# Altium footprint library XCVR_ESP32-C5-MINI-1-N4.PcbLib: 1 footprints
Each footprint in its own frame and in the unit in brackets; x right, y up, seen from the top. Pads: shape width x height; smd on the part's side, far side on the other; paste and mask are expansions set on the pad; w line width, h text height; cw(c..) or ccw(c..) is an arc to the next point about the centre after c.
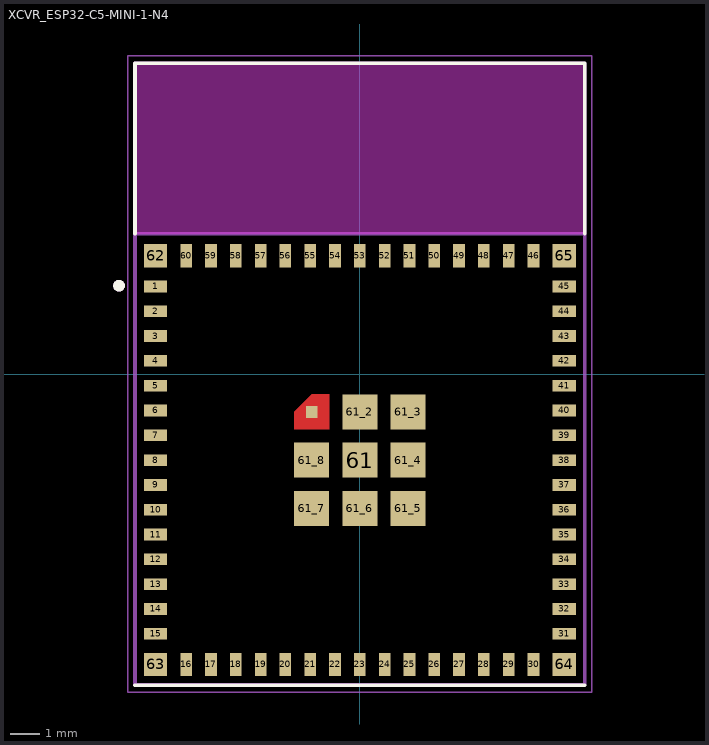
[diagram p0: the footprint, top view; thin cyan lines are the x and y axes]

## XCVR_ESP32-C5-MINI-1-N4 [mm]
height 2.55
pads (73):
  rect 0.8x0.4 smd paste+0 mask+0.102: 1(-7,3) 2(-7,2.15) 3(-7,1.3) 4(-7,0.45) 5(-7,-0.4) 6(-7,-1.25) 7(-7,-2.1) 8(-7,-2.95) 9(-7,-3.8) 10(-7,-4.65) 11(-7,-5.5) 12(-7,-6.35) 13(-7,-7.2) 14(-7,-8.05) 15(-7,-8.9) 31(7,-8.9) 32(7,-8.05) 33(7,-7.2) 34(7,-6.35) 35(7,-5.5) 36(7,-4.65) 37(7,-3.8) 38(7,-2.95) 39(7,-2.1) 40(7,-1.25) 41(7,-0.4) 42(7,0.45) 43(7,1.3) 44(7,2.15) 45(7,3)
  rect 0.4x0.8 smd paste+0 mask+0.102: 16(-5.95,-9.95) 17(-5.1,-9.95) 18(-4.25,-9.95) 19(-3.4,-9.95) 20(-2.55,-9.95) 21(-1.7,-9.95) 22(-0.85,-9.95) 23(0,-9.95) 24(0.85,-9.95) 25(1.7,-9.95) 26(2.55,-9.95) 27(3.4,-9.95) 28(4.25,-9.95) 29(5.1,-9.95) 30(5.95,-9.95) 46(5.95,4.05) 47(5.1,4.05) 48(4.25,4.05) 49(3.4,4.05) 50(2.55,4.05) 51(1.7,4.05) 52(0.85,4.05) 53(0,4.05) 54(-0.85,4.05) 55(-1.7,4.05) 56(-2.55,4.05) 57(-3.4,4.05) 58(-4.25,4.05) 59(-5.1,4.05) 60(-5.95,4.05)
  rect 1.2x1.2 smd paste+0 mask+0.102: 61(0,-2.95) 61_2(0,-1.3) 61_3(1.65,-1.3) 61_4(1.65,-2.95) 61_5(1.65,-4.6) 61_6(0,-4.6) 61_7(-1.65,-4.6) 61_8(-1.65,-2.95)
  rect 0.4x0.4 smd paste-1 mask+0: 61_1(-1.65,-1.3)
  rect 0.8x0.8 smd paste+0 mask+0.102: 62(-7,4.05) 63(-7,-9.95) 64(7,-9.95) 65(7,4.05)
Top Layer:
  region: -1.05,-1.9 -2.25,-1.9 -2.25,-1.3 -1.65,-0.7 -1.05,-0.7
Top Overlay:
  circle w0.2: c-8.25,3.025 r0.1
  lines w0.127: -7.7,-10.665 7.7,-10.665 ; -7.7,4.8 -7.7,10.65 7.7,10.65 7.7,4.8
Top Paste:
  region: -1.05,-1.9 -2.25,-1.9 -2.25,-1.3 -1.65,-0.7 -1.05,-0.7
Top Solder:
  region: -0.95,-2 -2.35,-2 -2.35,-1.25 -1.7,-0.6 -0.95,-0.6
Keep-Out Layer:
  region: 7.7,4.8 -7.7,4.8 -7.7,10.65 7.7,10.65
  region: 7.7,4.8 -7.7,4.8 -7.7,10.65 7.7,10.65
Assembly Top:
  circle w0.2: c-8.25,3.025 r0.1
  lines w0.127: -7.7,4.8 -7.7,-10.65 7.7,-10.65 7.7,4.8 ; -7.7,4.8 -7.7,10.65 7.7,10.65 7.7,4.8 ; -7.7,4.8 7.7,4.8
Courtyard Top:
  lines w0.05: -7.95,-10.9 -7.95,10.9 7.95,10.9 7.95,-10.9 -7.95,-10.9
3D body "step_temp.STEP": height 2.55, standoff 0, extent -7.7,-10.65 7.7,10.65